# Altium footprint library 环境监测系统PCB库.PcbLib: 11 footprints
Each footprint in its own frame and in the unit in brackets; x right, y up, seen from the top. Pads: shape width x height; smd on the part's side, far side on the other; paste and mask are expansions set on the pad; w line width, h text height; cw(c..) or ccw(c..) is an arc to the next point about the centre after c.
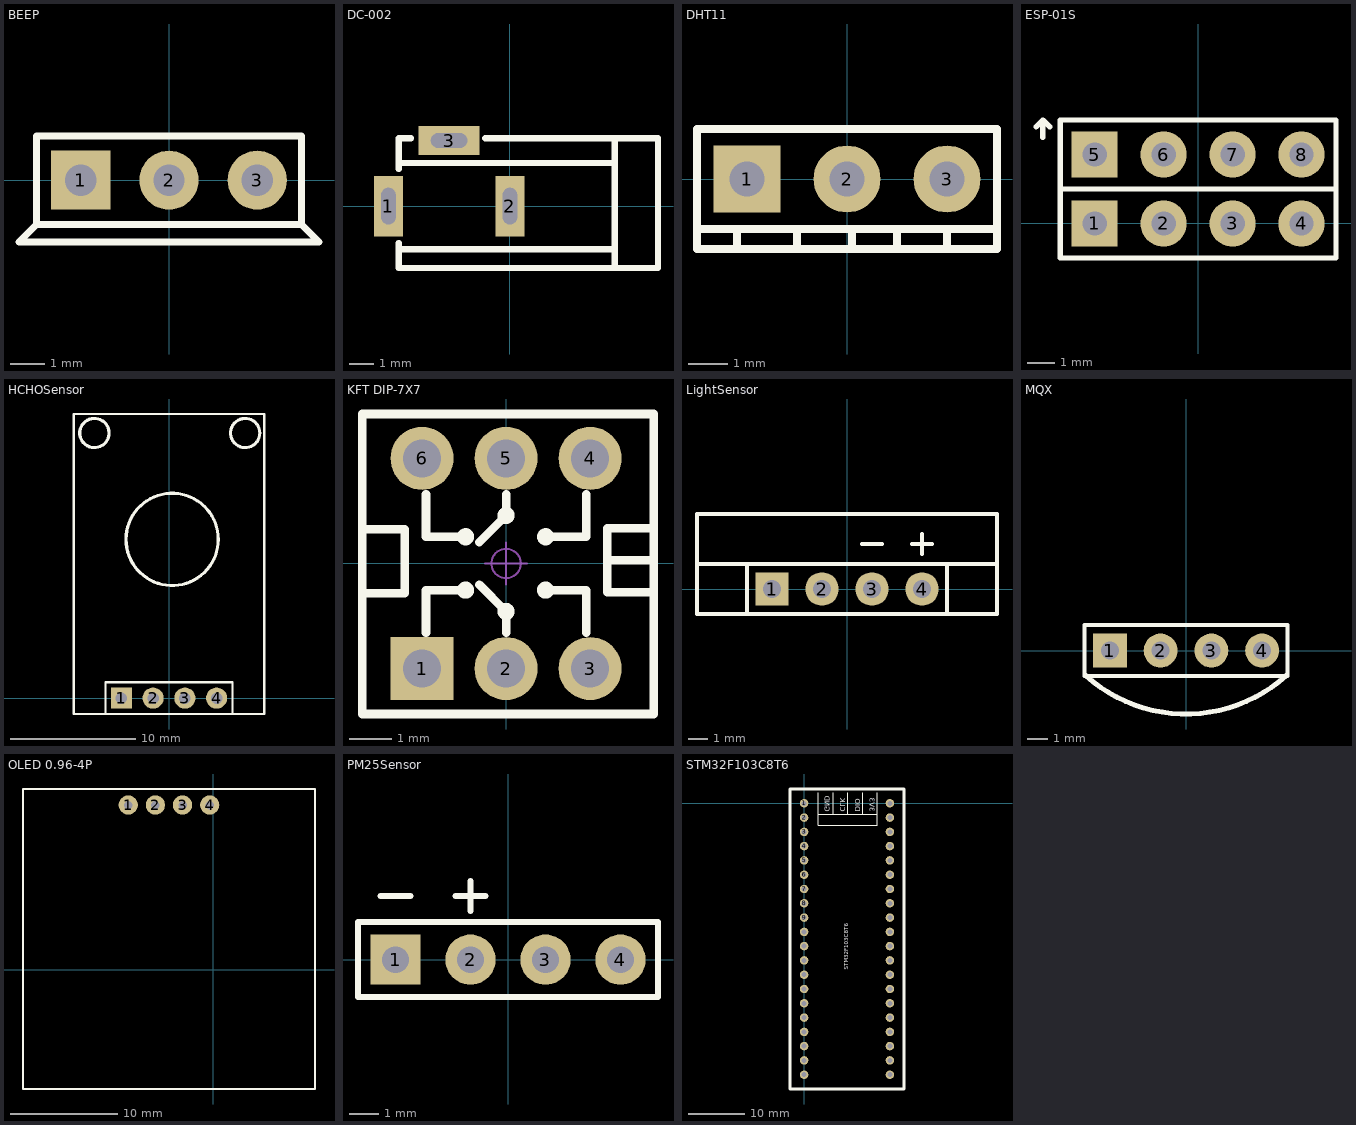
[diagram p0: the footprints below, top view; thin cyan lines are the x and y axes]

## BEEP [mm] "蜂鸣器"
pads (3):
  rect 1.7x1.7 hole 0.9: 1(-2.54,0)
  round 1.7 hole 0.9: 2(0,0) 3(2.54,0)
Top Overlay:
  lines w0.2: -3.81,-1.27 -4.318,-1.778 4.318,-1.778 3.81,-1.27 ; -3.81,-1.27 3.81,-1.27 ; -3.81,-1.27 -3.81,1.27 3.81,1.27 3.81,-1.27
3D body "HDR2.54-1P.STEP": height 8.5, standoff -3, extent -3.81,-1.27 -1.27,1.27
3D body "HDR2.54-1P.STEP": height 8.5, standoff -3, extent -1.27,-1.27 1.27,1.27
3D body "HDR2.54-1P.STEP": height 8.5, standoff -3, extent 1.27,-1.27 3.81,1.27

## DC-002 [mm] "3.5*1.1mm,       淘宝ID:黄晶宝石"
pads (3):
  rect 1.2x2.5 hole 0.6 slot 1.5 at 90 deg: 1(-5,0) 2(0,0)
  rect 2.5x1.2 hole 0.6 slot 1.5 at 0 deg: 3(-2.5,2.7)
Top Overlay:
  lines w0.254: -4.572,-1.778 4.318,-1.778 ; -4.572,-1.524 -4.572,-2.54 6.096,-2.54 6.096,2.794 -1.016,2.794 ; -4.572,1.524 -4.572,2.794 -4.064,2.794 ; -4.572,1.778 4.318,1.778 ; 4.318,-2.54 4.318,-1.778 ; 4.318,2.794 4.318,1.778 ; 4.318,-1.778 4.318,1.778
3D body "dc-002.STEP": height 7.3, standoff -3.4, extent -5.3,-2.5 6,2.85

## DHT11 [mm] "排针，3脚"
pads (3):
  rect 1.7x1.7 hole 0.9: 1(-2.54,0)
  round 1.7 hole 0.9: 2(0,0) 3(2.54,0)
Top Overlay:
  lines w0.2: -2.794,-1.778 -2.794,-1.27 ; -1.27,-1.651 -1.27,-1.27 ; 0.127,-1.778 0.127,-1.27 ; 1.27,-1.778 1.27,-1.27 ; 2.54,-1.778 2.54,-1.27 ; -3.81,-1.27 3.81,-1.27 ; -3.81,-1.27 -3.81,1.27 3.81,1.27 3.81,-1.27 ; -3.81,-1.27 -3.81,-1.778 3.81,-1.778 3.81,-1.27
3D body "HDR2.54-1P.STEP": height 8.5, standoff -3, extent -3.81,-1.27 -1.27,1.27
3D body "HDR2.54-1P.STEP": height 8.5, standoff -3, extent -1.27,-1.27 1.27,1.27
3D body "HDR2.54-1P.STEP": height 8.5, standoff -3, extent 1.27,-1.27 3.81,1.27

## ESP-01S [mm] "排母，4脚"
pads (8):
  rect 1.7x1.7 hole 0.9: 1(-3.81,0) 5(-3.81,2.54)
  round 1.7 hole 0.9: 2(-1.27,0) 3(1.27,0) 4(3.81,0) 6(-1.27,2.54) 7(1.27,2.54) 8(3.81,2.54)
Top Overlay:
  lines w0.2: -5.969,3.556 -5.715,3.81 ; -5.715,3.175 -5.715,3.81 ; -5.461,3.556 -5.715,3.81 ; -5.08,1.27 -5.08,3.81 5.08,3.81 5.08,1.27 ; -5.08,1.27 5.08,1.27 ; -5.08,1.27 5.08,1.27 ; -5.08,1.27 -5.08,-1.27 5.08,-1.27 5.08,1.27
3D body "HDR2.54-1P_M.STEP": height 8.5, standoff -3, extent -2.54,1.27 0,3.81
3D body "HDR2.54-1P_M.STEP": height 8.5, standoff -3, extent -5.08,1.27 -2.54,3.81
3D body "HDR2.54-1P_M.STEP": height 8.5, standoff -3, extent 2.54,1.27 5.08,3.81
3D body "HDR2.54-1P_M.STEP": height 8.5, standoff -3, extent 0,1.27 2.54,3.81
3D body "HDR2.54-1P_M.STEP": height 8.5, standoff -3, extent 0,-1.27 2.54,1.27
3D body "HDR2.54-1P_M.STEP": height 8.5, standoff -3, extent 2.54,-1.27 5.08,1.27
3D body "HDR2.54-1P_M.STEP": height 8.5, standoff -3, extent -5.08,-1.27 -2.54,1.27
3D body "HDR2.54-1P_M.STEP": height 8.5, standoff -3, extent -2.54,-1.27 0,1.27

## HCHOSensor [mm] "甲醛传感器"
pads (4):
  rect 1.7x1.7 hole 0.9: 1(-3.81,0)
  round 1.7 hole 0.9: 2(-1.27,0) 3(1.27,0) 4(3.81,0)
Top Overlay:
  circle w0.254: c0.254,12.7 r3.692
  circle w0.254: c-5.969,21.209 r1.171
  circle w0.254: c6.096,21.209 r1.171
  lines w0.2: -5.08,-1.27 -5.08,1.27 5.08,1.27 5.08,-1.27 ; -5.08,-1.27 5.08,-1.27 ; -5.08,-1.27 -7.62,-1.27 -7.62,22.73 7.62,22.73 7.62,-1.27 5.08,-1.27
3D body "HDR2.54-1P.STEP": height 8.5, standoff -3, extent -5.08,-1.27 -2.54,1.27
3D body "HDR2.54-1P.STEP": height 8.5, standoff -3, extent -2.54,-1.27 0,1.27
3D body "HDR2.54-1P.STEP": height 8.5, standoff -3, extent 0,-1.27 2.54,1.27
3D body "HDR2.54-1P.STEP": height 8.5, standoff -3, extent 2.54,-1.27 5.08,1.27

## KFT DIP-7X7 [mm] "自锁开关，规格：7*7mm"
pads (6):
  rect 1.5x1.5 hole 0.9: 1(-2,-2.5)
  round 1.5 hole 0.9: 2(0,-2.5) 3(2,-2.5) 4(2,2.5) 5(0,2.5) 6(-2,2.5)
Top Overlay:
  circle w0.254: c0.94,-0.635 r0.076
  circle w0.254: c-0.965,-0.635 r0.076
  circle w0.254: c0,-1.143 r0.076
  circle w0.254: c0,1.143 r0.076
  circle w0.254: c-0.965,0.635 r0.076
  circle w0.254: c0.94,0.635 r0.076
  lines w0.203: -3.422,-0.712 -2.406,-0.712 -2.406,0.812 -3.422,0.812 ; -1.905,-1.651 -1.905,-0.635 -0.889,-0.635 ; -1.905,1.651 -1.905,0.635 -0.889,0.635 ; -0.635,-0.508 0,-1.143 0,-1.651 ; -0.635,0.508 0,1.143 0,1.651 ; 1.016,-0.635 1.905,-0.635 1.905,-1.651 ; 1.016,0.635 1.905,0.635 1.905,1.651 ; 2.406,0.077 3.471,0.077 ; 3.422,-0.685 2.406,-0.685 2.406,0.839 3.422,0.839 ; -3.42,-3.581 3.514,-3.581 3.514,2.54 3.514,3.556 -3.42,3.556 -3.42,-3.581
Mechanical 15:
  circle w0.05: c0,0 r0.35
  lines w0.05: -0.5,0 0.5,0 ; 0,-0.5 0,0.5
3D body "SLSW 7x7.STEP": height 11.2, standoff -3.2, extent -3.5,-3.5 3.5,3.5

## LightSensor [mm] "光敏传感器"
pads (4):
  rect 1.7x1.7 hole 0.9: 1(-3.81,0)
  round 1.7 hole 0.9: 2(-1.27,0) 3(1.27,0) 4(3.81,0)
Top Overlay:
  lines w0.2: 0.762,2.286 1.778,2.286 ; 3.302,2.286 4.318,2.286 ; 3.81,1.778 3.81,2.794 ; -7.62,1.27 -7.62,3.81 7.62,3.81 7.62,1.27 ; -7.62,1.27 -5.08,1.27 ; -7.62,1.27 -7.62,-1.27 -5.08,-1.27 ; -5.08,-1.27 5.08,-1.27 ; -5.08,-1.27 -5.08,1.27 ; -5.08,1.27 5.08,1.27 ; 5.08,-1.27 5.08,1.27 ; 5.08,-1.27 7.62,-1.27 7.62,1.27 ; 5.08,1.27 7.62,1.27
3D body "HDR2.54-1P.STEP": height 8.5, standoff -3, extent 2.54,-1.27 5.08,1.27
3D body "HDR2.54-1P.STEP": height 8.5, standoff -3, extent 0,-1.27 2.54,1.27
3D body "HDR2.54-1P.STEP": height 8.5, standoff -3, extent -2.54,-1.27 0,1.27
3D body "HDR2.54-1P.STEP": height 8.5, standoff -3, extent -5.08,-1.27 -2.54,1.27

## MQX [mm] "排针，4脚"
pads (4):
  rect 1.7x1.7 hole 0.9: 1(-3.81,0)
  round 1.7 hole 0.9: 2(-1.27,0) 3(1.27,0) 4(3.81,0)
Top Overlay:
  lines w0.2: -5.08,-1.27 -5.08,1.27 5.08,1.27 5.08,-1.27 -5.08,-1.27
  lines w0.254: -5.017,-1.254 ccw(c0,4.333) 5.017,-1.254
3D body "HDR2.54-1P.STEP": height 8.5, standoff -3, extent -5.08,-1.27 -2.54,1.27
3D body "HDR2.54-1P.STEP": height 8.5, standoff -3, extent -2.54,-1.27 0,1.27
3D body "HDR2.54-1P.STEP": height 8.5, standoff -3, extent 0,-1.27 2.54,1.27
3D body "HDR2.54-1P.STEP": height 8.5, standoff -3, extent 2.54,-1.27 5.08,1.27

## OLED 0.96-4P [mm] "长：35.4mm，宽：33.5mm，"
pads (4):
  round 1.8 hole 0.8: 1(-7.94,15.391) 2(-5.4,15.391) 3(-2.86,15.391) 4(-0.32,15.391)
Top Overlay:
  lines w0.2: -17.78,-11.176 9.52,-11.176 ; -17.78,-11.109 -17.78,16.891 9.52,16.891 ; 9.525,-11.109 9.525,16.891
3D body "LM096-128064 OLED DISPLAY .step": height 3, standoff -8.6, extent -17.664,-10.806 9.536,16.394

## PM25Sensor [mm] "PM25传感器"
pads (4):
  rect 1.7x1.7 hole 0.9: 1(-3.81,0)
  round 1.7 hole 0.9: 2(-1.27,0) 3(1.27,0) 4(3.81,0)
Top Overlay:
  lines w0.2: -4.318,2.159 -3.302,2.159 ; -1.778,2.159 -0.762,2.159 ; -1.27,1.651 -1.27,2.667 ; -5.08,-1.27 5.08,-1.27 5.08,1.27 -5.08,1.27 -5.08,-1.27
3D body "HDR2.54-1P.STEP": height 8.5, standoff -3, extent 2.54,-1.27 5.08,1.27
3D body "HDR2.54-1P.STEP": height 8.5, standoff -3, extent 0,-1.27 2.54,1.27
3D body "HDR2.54-1P.STEP": height 8.5, standoff -3, extent -2.54,-1.27 0,1.27
3D body "HDR2.54-1P.STEP": height 8.5, standoff -3, extent -5.08,-1.27 -2.54,1.27

## STM32F103C8T6 [mm]
pads (40):
  round 1.5 hole 0.9: 1(0,0) 2(0,-2.54) 3(0,-5.08) 4(0,-7.62) 5(0,-10.16) 6(0,-12.7) 7(0,-15.24) 8(0,-17.78) 9(0,-20.32) 10(0,-22.86) 11(0,-25.4) 12(0,-27.94) 13(0,-30.48) 14(0,-33.02) 15(0,-35.56) 16(0,-38.1) 17(0,-40.64) 18(0,-43.18) 19(0,-45.72) 20(0,-48.26) 21(15.24,-48.26) 22(15.24,-45.72) 23(15.24,-43.18) 24(15.24,-40.64) 25(15.24,-38.1) 26(15.24,-35.56) 27(15.24,-33.02) 28(15.24,-30.48) 29(15.24,-27.94) 30(15.24,-25.4) 31(15.24,-22.86) 32(15.24,-20.32) 33(15.24,-17.78) 34(15.24,-15.24) 35(15.24,-12.7) 36(15.24,-10.16) 37(15.24,-7.62) 38(15.24,-5.08) 39(15.24,-2.54) 40(15.24,0)
Top Overlay:
  lines w0.127: 2.54,1.905 2.54,-1.905 ; 5.207,-1.905 5.207,1.905 ; 7.747,-1.905 7.747,1.905 ; 10.414,-1.905 10.414,1.905 ; 12.954,1.905 12.954,-1.905 ; 2.54,-1.905 2.54,-3.937 12.954,-3.937 12.954,-1.905 ; 2.54,-1.905 12.954,-1.905
  lines w0.508: -2.54,-50.8 17.78,-50.8 17.78,-50.419 17.78,2.54 -2.54,2.54 -2.54,0.381 -2.54,-50.8
  text "3V3" at 11.303,-1.524 h1.52
  text "DIO" at 8.763,-1.524 h1.52
  text "CLK" at 6.096,-1.524 h1.52
  text "GND" at 3.302,-1.524 h1.52
  text "STM32F103C8T6" at 8.128,-29.591 h1.2